# Altium footprint library HI1206P121R-10.PcbLib: 3 footprints
Each footprint in its own frame and in the unit in brackets; x right, y up, seen from the top. Pads: shape width x height; smd on the part's side, far side on the other; paste and mask are expansions set on the pad; w line width, h text height; cw(c..) or ccw(c..) is an arc to the next point about the centre after c.
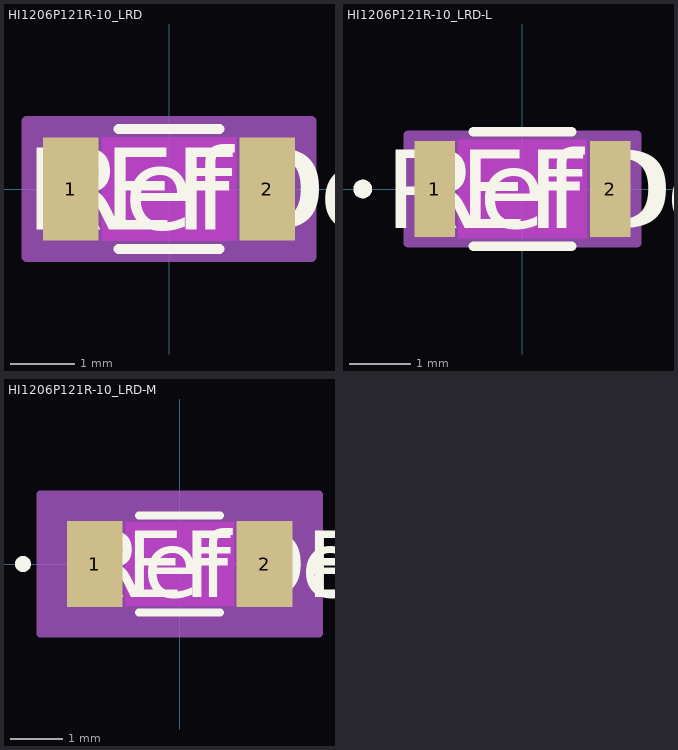
[diagram p0: the footprints below, top view; thin cyan lines are the x and y axes]

## HI1206P121R-10_LRD [mil]
pads (2):
  rect 34x63 smd paste+0 mask+0: 1(-60,0) 2(60,0)
Top Layer keep-out:
  region: -41,-29.5 -41,29.5 41,29.5 41,-29.5
Top Overlay:
  lines w6: -30.89,-36.5 30.89,-36.5 ; -30.89,36.5 30.89,36.5
  text "RefDes" at -75,-25 h50
  text "REFDES" at -87.5,-25 h50
Keep-Out Layer:
  region: -41,-31.5 -41,31.5 41,31.5 41,-31.5
Mechanical 13:
  circle w0: c-55,0 r0
  lines w1: -63,-31.5 -63,31.5 ; -63,-31.5 -43,-31.5 -43,31.5 -63,31.5 ; -63,-31.5 63,-31.5 ; -63,-31.5 -63,31.5 ; -63,31.5 63,31.5 ; 63,-31.5 43,-31.5 43,31.5 63,31.5 ; 63,-31.5 63,31.5 ; 63,-31.5 63,31.5
  text "RefDes2" at -87.5,-25 h50
Mechanical 15:
  region: 87,-41.5 -87,-41.5 -87,41.5 87,41.5
  lines w6: -87,-41.5 -87,41.5 87,41.5 87,-41.5 -87,-41.5
3D body "HI1206P121R-10_LRD.step": height 42.99, standoff 0, extent -62.99,-31.5 62.99,31.5

## HI1206P121R-10_LRD-L [mil]
pads (2):
  rect 26x61 smd paste+0 mask+0: 1(-56,0) 2(56,0)
Top Layer keep-out:
  region: -41,-29.5 -41,29.5 41,29.5 41,-29.5
Top Overlay:
  circle w6: c-102,0 r3
  lines w6: -31.35,-36.5 31.35,-36.5 ; -31.35,36.5 31.35,36.5
  text "RefDes" at -75,-25 h50
  text "REFDES" at -87.5,-25 h50
Keep-Out Layer:
  region: -41,-31.5 -41,31.5 41,31.5 41,-31.5
Mechanical 13:
  circle w0: c-51,0 r3
  lines w1: -63,-31.5 -63,31.5 ; -63,-31.5 -43,-31.5 -43,31.5 -63,31.5 ; -63,-31.5 63,-31.5 ; -63,-31.5 -63,31.5 ; -63,31.5 63,31.5 ; 63,-31.5 43,-31.5 43,31.5 63,31.5 ; 63,-31.5 63,31.5 ; 63,-31.5 63,31.5
  text "RefDes2" at -87.5,-25 h50
Mechanical 15:
  region: 73,-34.5 -73,-34.5 -73,34.5 73,34.5
  lines w6: -73,-34.5 -73,34.5 73,34.5 73,-34.5 -73,-34.5
3D body "HI1206P121R-10_LRD.step": height 42.99, standoff 0, extent -62.99,-31.5 62.99,31.5

## HI1206P121R-10_LRD-M [mil]
pads (2):
  rect 42x65 smd paste+0 mask+0: 1(-64,0) 2(64,0)
Top Layer keep-out:
  region: -41,-29.5 -41,29.5 41,29.5 41,-29.5
Top Overlay:
  circle w6: c-118,0 r3
  lines w6: -30.53,-36.5 30.53,-36.5 ; -30.53,36.5 30.53,36.5
  text "RefDes" at -75,-25 h50
  text "REFDES" at -87.5,-25 h50
Keep-Out Layer:
  region: -41,-31.5 -41,31.5 41,31.5 41,-31.5
Mechanical 13:
  circle w0: c-59,0 r3
  lines w1: -63,-31.5 -63,31.5 ; -63,-31.5 -43,-31.5 -43,31.5 -63,31.5 ; -63,-31.5 63,-31.5 ; -63,-31.5 -63,31.5 ; -63,31.5 63,31.5 ; 63,-31.5 43,-31.5 43,31.5 63,31.5 ; 63,-31.5 63,31.5 ; 63,-31.5 63,31.5
  text "RefDes2" at -87.5,-25 h50
Mechanical 15:
  region: 105,-52.5 -105,-52.5 -105,52.5 105,52.5
  lines w6: -105,-52.5 -105,52.5 105,52.5 105,-52.5 -105,-52.5
3D body "HI1206P121R-10_LRD.step": height 42.99, standoff 0, extent -62.99,-31.5 62.99,31.5